# Altium footprint library aksima_footprint.PcbLib: 83 footprints (part 6 of 6)
Each footprint in its own frame and in the unit in brackets; x right, y up, seen from the top. Pads: shape width x height; smd on the part's side, far side on the other; paste and mask are expansions set on the pad; w line width, h text height; cw(c..) or ccw(c..) is an arc to the next point about the centre after c.
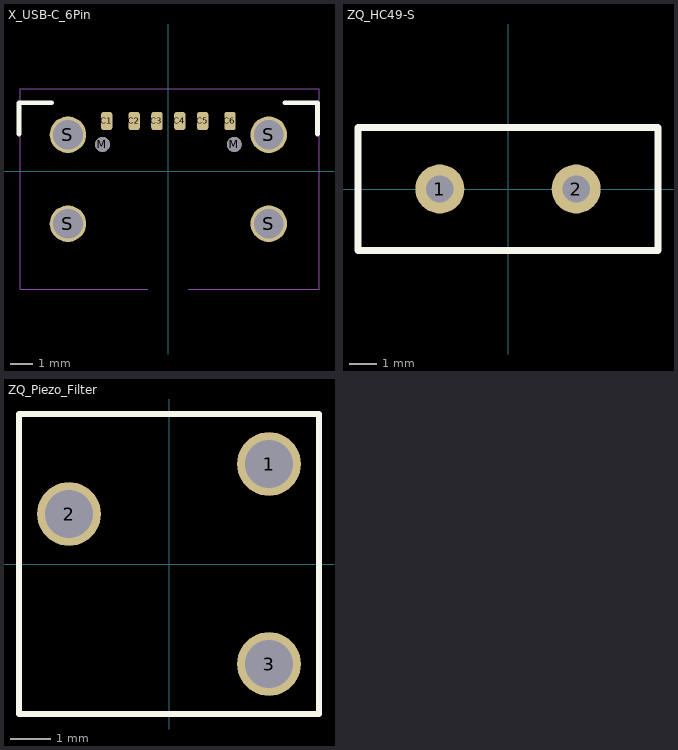
[diagram p5: the footprints below, top view; thin cyan lines are the x and y axes]

## X_USB-C_6Pin [mm] "Connector footprint, USB-C 6 pins"
pads (12):
  rrect50% 0.5x0.8 smd: C1(-2.7,2.2) C2(-1.5,2.2) C3(-0.5,2.2) C4(0.5,2.2) C5(1.5,2.2) C6(2.7,2.2)
  round 0.65 hole 0.65 unplated: M(-2.89,1.175) M(2.89,1.175)
  round 1.6 hole 1.3: S(-4.4,-2.3) S(-4.4,1.6) S(4.4,-2.3) S(4.4,1.6)
Top Overlay:
  circle w0.1: c-4.4,-2.3 r0.7
  lines w0.2: -6.544,1.625 -6.544,3.002 -5.11,3.002 ; 5.1,3.002 6.534,3.002 6.534,1.625
Mechanical 15:
  lines w0.05: -0.899,-5.161 -6.5,-5.161 -6.5,3.602 6.6,3.602 6.6,-5.161 0.879,-5.161
3D body "USB_type_C_smd_6p.stp": height 3.2, standoff -1.27, extent -4.6,-5.25 4.6,2.7

## ZQ_HC49-S [mm] "Quartz crystal, HC-49/S"
pads (2):
  round 1.8 hole 1: 1(-2.5,0) 2(2.5,0)
Top Overlay:
  lines w0.254: -5.5,-2.25 5.5,-2.25 5.5,2.25 -5.5,2.25 -5.5,-2.25
3D body "Quartz_HC49-S-Quartz_Cristal_Unit_HC49-S.step": height 3.36, standoff -3.07, extent -5.347,-2.209 5.347,2.209

## ZQ_Piezo_Filter [mm] "Frequency filter footprint, piezofilter"
pads (3):
  round 1.6 hole 1.2: 1(2.5,2.5) 2(-2.5,1.25) 3(2.5,-2.5)
Top Overlay:
  lines w0.15: -3.75,-3.75 3.75,-3.75 3.75,3.75 -3.75,3.75 -3.75,0.25 -3.75,-3.75
3D body "Filter.stp": height 10, standoff -2.3, extent -3.6,-3.75 3.6,3.75